# Altium integrated library BMP581.IntLib: 1 symbol
Pins are listed as number, name and electrical type; pins without a type are passive.

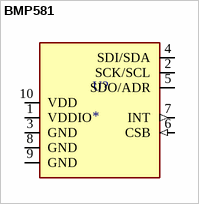
[diagram p0: symbol BMP581]

## BMP581
designator U?
Very small, low-power and low noise 24-bit absolute barometric pressure sensor. This digital, high-performance sensor is ideally suited for a wide range of altitude tracking applications and offers outstanding design flexibility; MF: Bosch; MP: BMP581; SnapEDA_Link: https://www.snapeda.com/parts/BMP581/Bosch/view-part/?ref=snap; Package: None; Value: *; Check_prices: https://www.snapeda.com/parts/BMP581/Bosch/view-part/?ref=eda
footprint BMP581
pins: 1 VDDIO (power), 2 SCK/SCL (io), 3 GND (power), 4 SDI/SDA (io), 5 SDO/ADR (io), 6 CSB (in), 7 INT (out), 8 GND (power), 9 GND (power), 10 VDD (power)